# Altium footprint library FootPrintLib_12.PcbLib: 319 footprints (part 11 of 20)
Each footprint in its own frame and in the unit in brackets; x right, y up, seen from the top. Pads: shape width x height; smd on the part's side, far side on the other; paste and mask are expansions set on the pad; w line width, h text height; cw(c..) or ccw(c..) is an arc to the next point about the centre after c.
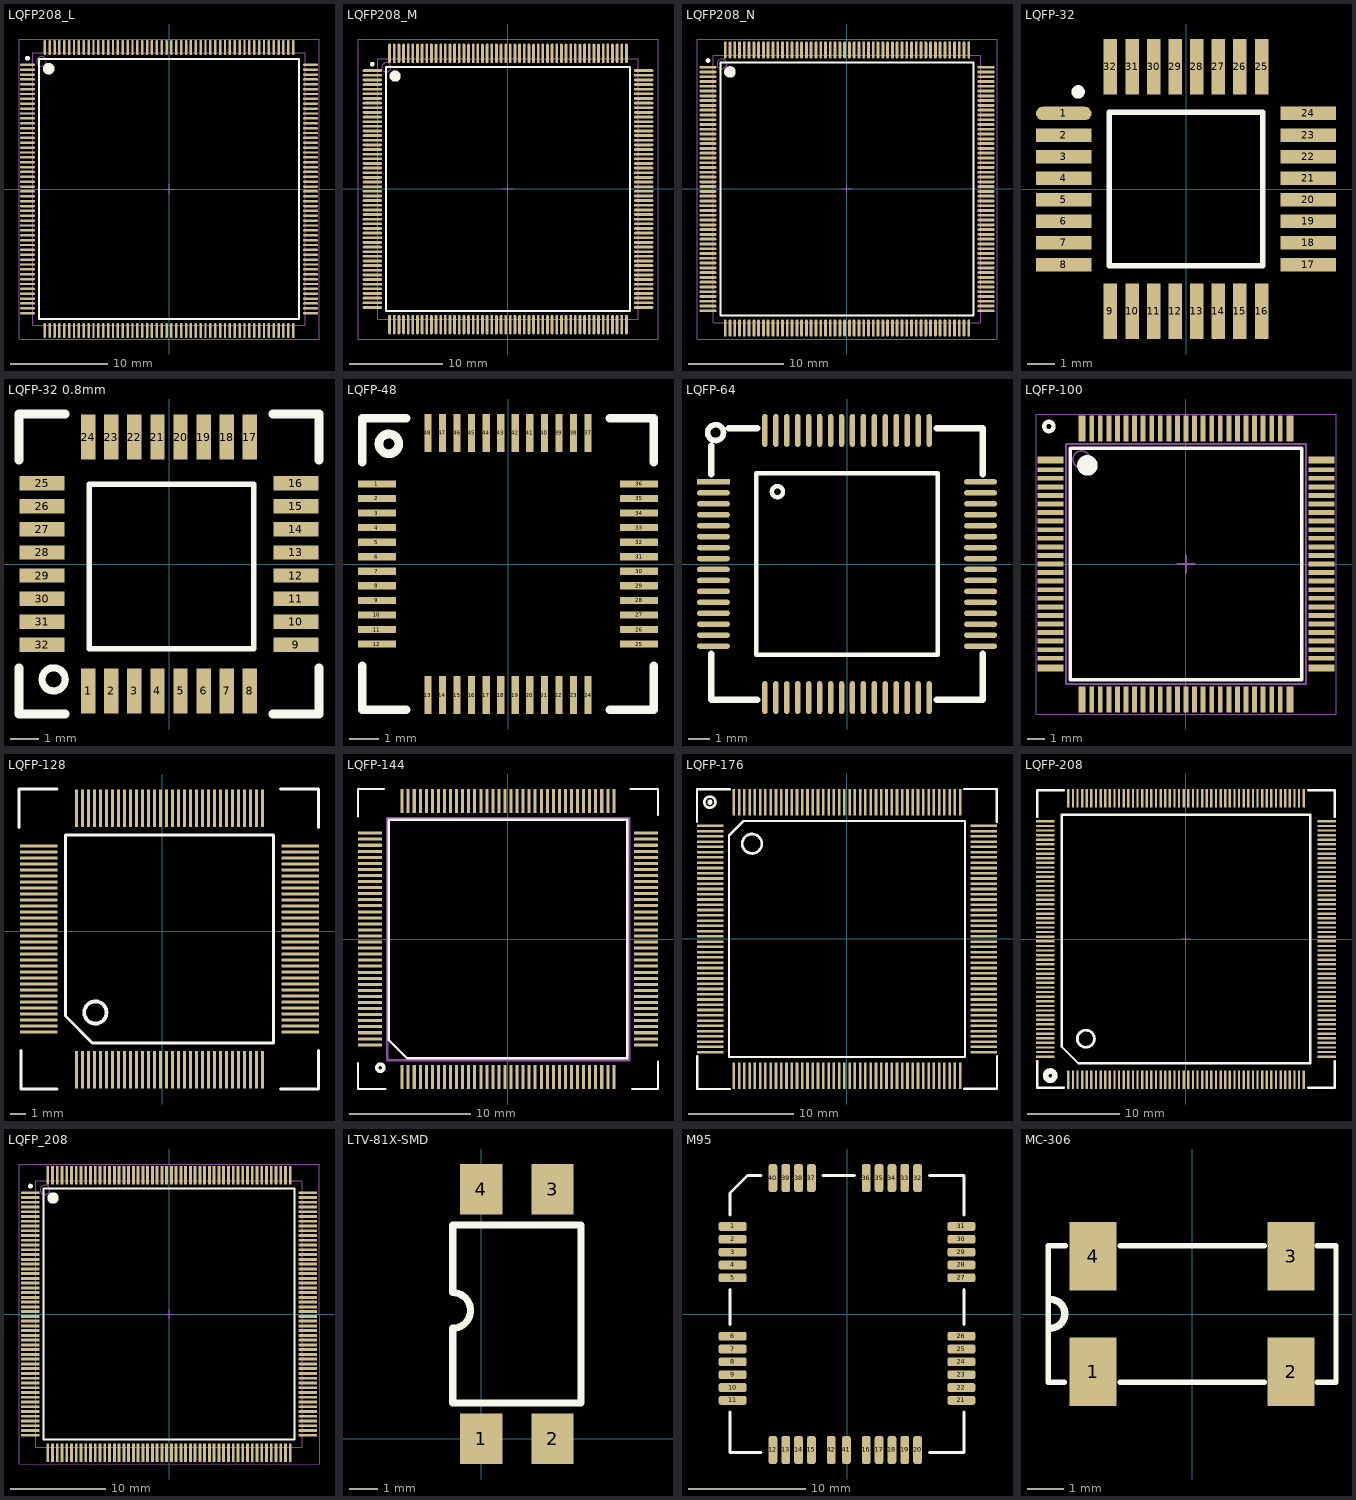
[diagram p10: the footprints below, top view; thin cyan lines are the x and y axes]

## LQFP208_L [mm] "QFP, 208-Leads, Body 28x28mm, Pitch 0.5mm, IPC High Density"
height 1.6
pads (208):
  oval 1.55x0.25 smd: 1(-14.525,12.75) 2(-14.525,12.25) 3(-14.525,11.75) 4(-14.525,11.25) 5(-14.525,10.75) 6(-14.525,10.25) 7(-14.525,9.75) 8(-14.525,9.25) 9(-14.525,8.75) 10(-14.525,8.25) 11(-14.525,7.75) 12(-14.525,7.25) 13(-14.525,6.75) 14(-14.525,6.25) 15(-14.525,5.75) 16(-14.525,5.25) 17(-14.525,4.75) 18(-14.525,4.25) 19(-14.525,3.75) 20(-14.525,3.25) 21(-14.525,2.75) 22(-14.525,2.25) 23(-14.525,1.75) 24(-14.525,1.25) 25(-14.525,0.75) 26(-14.525,0.25) 27(-14.525,-0.25) 28(-14.525,-0.75) 29(-14.525,-1.25) 30(-14.525,-1.75) 31(-14.525,-2.25) 32(-14.525,-2.75) 33(-14.525,-3.25) 34(-14.525,-3.75) 35(-14.525,-4.25) 36(-14.525,-4.75) 37(-14.525,-5.25) 38(-14.525,-5.75) 39(-14.525,-6.25) 40(-14.525,-6.75) 41(-14.525,-7.25) 42(-14.525,-7.75) 43(-14.525,-8.25) 44(-14.525,-8.75) 45(-14.525,-9.25) 46(-14.525,-9.75) 47(-14.525,-10.25) 48(-14.525,-10.75) 49(-14.525,-11.25) 50(-14.525,-11.75) 51(-14.525,-12.25) 52(-14.525,-12.75) 105(14.525,-12.75) 106(14.525,-12.25) 107(14.525,-11.75) 108(14.525,-11.25) 109(14.525,-10.75) 110(14.525,-10.25) 111(14.525,-9.75) 112(14.525,-9.25) 113(14.525,-8.75) 114(14.525,-8.25) 115(14.525,-7.75) 116(14.525,-7.25) 117(14.525,-6.75) 118(14.525,-6.25) 119(14.525,-5.75) 120(14.525,-5.25) 121(14.525,-4.75) 122(14.525,-4.25) 123(14.525,-3.75) 124(14.525,-3.25) 125(14.525,-2.75) 126(14.525,-2.25) 127(14.525,-1.75) 128(14.525,-1.25) 129(14.525,-0.75) 130(14.525,-0.25) 131(14.525,0.25) 132(14.525,0.75) 133(14.525,1.25) 134(14.525,1.75) 135(14.525,2.25) 136(14.525,2.75) 137(14.525,3.25) 138(14.525,3.75) 139(14.525,4.25) 140(14.525,4.75) 141(14.525,5.25) 142(14.525,5.75) 143(14.525,6.25) 144(14.525,6.75) 145(14.525,7.25) 146(14.525,7.75) 147(14.525,8.25) 148(14.525,8.75) 149(14.525,9.25) 150(14.525,9.75) 151(14.525,10.25) 152(14.525,10.75) 153(14.525,11.25) 154(14.525,11.75) 155(14.525,12.25) 156(14.525,12.75)
  oval 0.25x1.55 smd: 53(-12.75,-14.525) 54(-12.25,-14.525) 55(-11.75,-14.525) 56(-11.25,-14.525) 57(-10.75,-14.525) 58(-10.25,-14.525) 59(-9.75,-14.525) 60(-9.25,-14.525) 61(-8.75,-14.525) 62(-8.25,-14.525) 63(-7.75,-14.525) 64(-7.25,-14.525) 65(-6.75,-14.525) 66(-6.25,-14.525) 67(-5.75,-14.525) 68(-5.25,-14.525) 69(-4.75,-14.525) 70(-4.25,-14.525) 71(-3.75,-14.525) 72(-3.25,-14.525) 73(-2.75,-14.525) 74(-2.25,-14.525) 75(-1.75,-14.525) 76(-1.25,-14.525) 77(-0.75,-14.525) 78(-0.25,-14.525) 79(0.25,-14.525) 80(0.75,-14.525) 81(1.25,-14.525) 82(1.75,-14.525) 83(2.25,-14.525) 84(2.75,-14.525) 85(3.25,-14.525) 86(3.75,-14.525) 87(4.25,-14.525) 88(4.75,-14.525) 89(5.25,-14.525) 90(5.75,-14.525) 91(6.25,-14.525) 92(6.75,-14.525) 93(7.25,-14.525) 94(7.75,-14.525) 95(8.25,-14.525) 96(8.75,-14.525) 97(9.25,-14.525) 98(9.75,-14.525) 99(10.25,-14.525) 100(10.75,-14.525) 101(11.25,-14.525) 102(11.75,-14.525) 103(12.25,-14.525) 104(12.75,-14.525) 157(12.75,14.525) 158(12.25,14.525) 159(11.75,14.525) 160(11.25,14.525) 161(10.75,14.525) 162(10.25,14.525) 163(9.75,14.525) 164(9.25,14.525) 165(8.75,14.525) 166(8.25,14.525) 167(7.75,14.525) 168(7.25,14.525) 169(6.75,14.525) 170(6.25,14.525) 171(5.75,14.525) 172(5.25,14.525) 173(4.75,14.525) 174(4.25,14.525) 175(3.75,14.525) 176(3.25,14.525) 177(2.75,14.525) 178(2.25,14.525) 179(1.75,14.525) 180(1.25,14.525) 181(0.75,14.525) 182(0.25,14.525) 183(-0.25,14.525) 184(-0.75,14.525) 185(-1.25,14.525) 186(-1.75,14.525) 187(-2.25,14.525) 188(-2.75,14.525) 189(-3.25,14.525) 190(-3.75,14.525) 191(-4.25,14.525) 192(-4.75,14.525) 193(-5.25,14.525) 194(-5.75,14.525) 195(-6.25,14.525) 196(-6.75,14.525) 197(-7.25,14.525) 198(-7.75,14.525) 199(-8.25,14.525) 200(-8.75,14.525) 201(-9.25,14.525) 202(-9.75,14.525) 203(-10.25,14.525) 204(-10.75,14.525) 205(-11.25,14.525) 206(-11.75,14.525) 207(-12.25,14.525) 208(-12.75,14.525)
Top Overlay:
  circle w0.25: c-14.525,13.425 r0.125
  circle w0.6: c-12.35,12.35 r0.3
  lines w0.2: -13.35,-13.35 -13.35,13.35 13.35,13.35 13.35,-13.35 -13.35,-13.35
Mechanical 13:
  circle w0.1: c-13.1,13.1 r0.5
  lines w0.1: -14,-14 -14,14 14,14 14,-14 -14,-14
Mechanical 15:
  lines w0.05: -15.4,-15.4 -15.4,15.4 15.4,15.4 15.4,-15.4 -15.4,-15.4
  lines w0.1: -0.5,0 0.5,0 ; 0,-0.5 0,0.5
3D body: height 1.6, standoff 0.05, extent -14,-14 14,14

## LQFP208_M [mm] "QFP, 208-Leads, Body 28x28mm, Pitch 0.5mm, IPC Low Density"
height 1.6
pads (208):
  oval 2.1x0.3 smd: 1(-14.6,12.75) 2(-14.6,12.25) 3(-14.6,11.75) 4(-14.6,11.25) 5(-14.6,10.75) 6(-14.6,10.25) 7(-14.6,9.75) 8(-14.6,9.25) 9(-14.6,8.75) 10(-14.6,8.25) 11(-14.6,7.75) 12(-14.6,7.25) 13(-14.6,6.75) 14(-14.6,6.25) 15(-14.6,5.75) 16(-14.6,5.25) 17(-14.6,4.75) 18(-14.6,4.25) 19(-14.6,3.75) 20(-14.6,3.25) 21(-14.6,2.75) 22(-14.6,2.25) 23(-14.6,1.75) 24(-14.6,1.25) 25(-14.6,0.75) 26(-14.6,0.25) 27(-14.6,-0.25) 28(-14.6,-0.75) 29(-14.6,-1.25) 30(-14.6,-1.75) 31(-14.6,-2.25) 32(-14.6,-2.75) 33(-14.6,-3.25) 34(-14.6,-3.75) 35(-14.6,-4.25) 36(-14.6,-4.75) 37(-14.6,-5.25) 38(-14.6,-5.75) 39(-14.6,-6.25) 40(-14.6,-6.75) 41(-14.6,-7.25) 42(-14.6,-7.75) 43(-14.6,-8.25) 44(-14.6,-8.75) 45(-14.6,-9.25) 46(-14.6,-9.75) 47(-14.6,-10.25) 48(-14.6,-10.75) 49(-14.6,-11.25) 50(-14.6,-11.75) 51(-14.6,-12.25) 52(-14.6,-12.75) 105(14.6,-12.75) 106(14.6,-12.25) 107(14.6,-11.75) 108(14.6,-11.25) 109(14.6,-10.75) 110(14.6,-10.25) 111(14.6,-9.75) 112(14.6,-9.25) 113(14.6,-8.75) 114(14.6,-8.25) 115(14.6,-7.75) 116(14.6,-7.25) 117(14.6,-6.75) 118(14.6,-6.25) 119(14.6,-5.75) 120(14.6,-5.25) 121(14.6,-4.75) 122(14.6,-4.25) 123(14.6,-3.75) 124(14.6,-3.25) 125(14.6,-2.75) 126(14.6,-2.25) 127(14.6,-1.75) 128(14.6,-1.25) 129(14.6,-0.75) 130(14.6,-0.25) 131(14.6,0.25) 132(14.6,0.75) 133(14.6,1.25) 134(14.6,1.75) 135(14.6,2.25) 136(14.6,2.75) 137(14.6,3.25) 138(14.6,3.75) 139(14.6,4.25) 140(14.6,4.75) 141(14.6,5.25) 142(14.6,5.75) 143(14.6,6.25) 144(14.6,6.75) 145(14.6,7.25) 146(14.6,7.75) 147(14.6,8.25) 148(14.6,8.75) 149(14.6,9.25) 150(14.6,9.75) 151(14.6,10.25) 152(14.6,10.75) 153(14.6,11.25) 154(14.6,11.75) 155(14.6,12.25) 156(14.6,12.75)
  oval 0.3x2.1 smd: 53(-12.75,-14.6) 54(-12.25,-14.6) 55(-11.75,-14.6) 56(-11.25,-14.6) 57(-10.75,-14.6) 58(-10.25,-14.6) 59(-9.75,-14.6) 60(-9.25,-14.6) 61(-8.75,-14.6) 62(-8.25,-14.6) 63(-7.75,-14.6) 64(-7.25,-14.6) 65(-6.75,-14.6) 66(-6.25,-14.6) 67(-5.75,-14.6) 68(-5.25,-14.6) 69(-4.75,-14.6) 70(-4.25,-14.6) 71(-3.75,-14.6) 72(-3.25,-14.6) 73(-2.75,-14.6) 74(-2.25,-14.6) 75(-1.75,-14.6) 76(-1.25,-14.6) 77(-0.75,-14.6) 78(-0.25,-14.6) 79(0.25,-14.6) 80(0.75,-14.6) 81(1.25,-14.6) 82(1.75,-14.6) 83(2.25,-14.6) 84(2.75,-14.6) 85(3.25,-14.6) 86(3.75,-14.6) 87(4.25,-14.6) 88(4.75,-14.6) 89(5.25,-14.6) 90(5.75,-14.6) 91(6.25,-14.6) 92(6.75,-14.6) 93(7.25,-14.6) 94(7.75,-14.6) 95(8.25,-14.6) 96(8.75,-14.6) 97(9.25,-14.6) 98(9.75,-14.6) 99(10.25,-14.6) 100(10.75,-14.6) 101(11.25,-14.6) 102(11.75,-14.6) 103(12.25,-14.6) 104(12.75,-14.6) 157(12.75,14.6) 158(12.25,14.6) 159(11.75,14.6) 160(11.25,14.6) 161(10.75,14.6) 162(10.25,14.6) 163(9.75,14.6) 164(9.25,14.6) 165(8.75,14.6) 166(8.25,14.6) 167(7.75,14.6) 168(7.25,14.6) 169(6.75,14.6) 170(6.25,14.6) 171(5.75,14.6) 172(5.25,14.6) 173(4.75,14.6) 174(4.25,14.6) 175(3.75,14.6) 176(3.25,14.6) 177(2.75,14.6) 178(2.25,14.6) 179(1.75,14.6) 180(1.25,14.6) 181(0.75,14.6) 182(0.25,14.6) 183(-0.25,14.6) 184(-0.75,14.6) 185(-1.25,14.6) 186(-1.75,14.6) 187(-2.25,14.6) 188(-2.75,14.6) 189(-3.25,14.6) 190(-3.75,14.6) 191(-4.25,14.6) 192(-4.75,14.6) 193(-5.25,14.6) 194(-5.75,14.6) 195(-6.25,14.6) 196(-6.75,14.6) 197(-7.25,14.6) 198(-7.75,14.6) 199(-8.25,14.6) 200(-8.75,14.6) 201(-9.25,14.6) 202(-9.75,14.6) 203(-10.25,14.6) 204(-10.75,14.6) 205(-11.25,14.6) 206(-11.75,14.6) 207(-12.25,14.6) 208(-12.75,14.6)
Top Overlay:
  circle w0.25: c-14.6,13.45 r0.125
  circle w0.6: c-12.15,12.15 r0.3
  lines w0.2: -13.15,-13.15 -13.15,13.15 13.15,13.15 13.15,-13.15 -13.15,-13.15
Mechanical 13:
  circle w0.1: c-13.1,13.1 r0.5
  lines w0.1: -14,-14 -14,14 14,14 14,-14 -14,-14
Mechanical 15:
  lines w0.05: -16.15,-16.15 -16.15,16.15 16.15,16.15 16.15,-16.15 -16.15,-16.15
  lines w0.1: -0.5,0 0.5,0 ; 0,-0.5 0,0.5
3D body: height 1.6, standoff 0.05, extent -14,-14 14,14

## LQFP208_N [mm] "QFP, 208-Leads, Body 28x28mm, Pitch 0.5mm, IPC Medium Density"
height 1.6
pads (208):
  oval 1.8x0.3 smd: 1(-14.55,12.75) 2(-14.55,12.25) 3(-14.55,11.75) 4(-14.55,11.25) 5(-14.55,10.75) 6(-14.55,10.25) 7(-14.55,9.75) 8(-14.55,9.25) 9(-14.55,8.75) 10(-14.55,8.25) 11(-14.55,7.75) 12(-14.55,7.25) 13(-14.55,6.75) 14(-14.55,6.25) 15(-14.55,5.75) 16(-14.55,5.25) 17(-14.55,4.75) 18(-14.55,4.25) 19(-14.55,3.75) 20(-14.55,3.25) 21(-14.55,2.75) 22(-14.55,2.25) 23(-14.55,1.75) 24(-14.55,1.25) 25(-14.55,0.75) 26(-14.55,0.25) 27(-14.55,-0.25) 28(-14.55,-0.75) 29(-14.55,-1.25) 30(-14.55,-1.75) 31(-14.55,-2.25) 32(-14.55,-2.75) 33(-14.55,-3.25) 34(-14.55,-3.75) 35(-14.55,-4.25) 36(-14.55,-4.75) 37(-14.55,-5.25) 38(-14.55,-5.75) 39(-14.55,-6.25) 40(-14.55,-6.75) 41(-14.55,-7.25) 42(-14.55,-7.75) 43(-14.55,-8.25) 44(-14.55,-8.75) 45(-14.55,-9.25) 46(-14.55,-9.75) 47(-14.55,-10.25) 48(-14.55,-10.75) 49(-14.55,-11.25) 50(-14.55,-11.75) 51(-14.55,-12.25) 52(-14.55,-12.75) 105(14.55,-12.75) 106(14.55,-12.25) 107(14.55,-11.75) 108(14.55,-11.25) 109(14.55,-10.75) 110(14.55,-10.25) 111(14.55,-9.75) 112(14.55,-9.25) 113(14.55,-8.75) 114(14.55,-8.25) 115(14.55,-7.75) 116(14.55,-7.25) 117(14.55,-6.75) 118(14.55,-6.25) 119(14.55,-5.75) 120(14.55,-5.25) 121(14.55,-4.75) 122(14.55,-4.25) 123(14.55,-3.75) 124(14.55,-3.25) 125(14.55,-2.75) 126(14.55,-2.25) 127(14.55,-1.75) 128(14.55,-1.25) 129(14.55,-0.75) 130(14.55,-0.25) 131(14.55,0.25) 132(14.55,0.75) 133(14.55,1.25) 134(14.55,1.75) 135(14.55,2.25) 136(14.55,2.75) 137(14.55,3.25) 138(14.55,3.75) 139(14.55,4.25) 140(14.55,4.75) 141(14.55,5.25) 142(14.55,5.75) 143(14.55,6.25) 144(14.55,6.75) 145(14.55,7.25) 146(14.55,7.75) 147(14.55,8.25) 148(14.55,8.75) 149(14.55,9.25) 150(14.55,9.75) 151(14.55,10.25) 152(14.55,10.75) 153(14.55,11.25) 154(14.55,11.75) 155(14.55,12.25) 156(14.55,12.75)
  oval 0.3x1.8 smd: 53(-12.75,-14.55) 54(-12.25,-14.55) 55(-11.75,-14.55) 56(-11.25,-14.55) 57(-10.75,-14.55) 58(-10.25,-14.55) 59(-9.75,-14.55) 60(-9.25,-14.55) 61(-8.75,-14.55) 62(-8.25,-14.55) 63(-7.75,-14.55) 64(-7.25,-14.55) 65(-6.75,-14.55) 66(-6.25,-14.55) 67(-5.75,-14.55) 68(-5.25,-14.55) 69(-4.75,-14.55) 70(-4.25,-14.55) 71(-3.75,-14.55) 72(-3.25,-14.55) 73(-2.75,-14.55) 74(-2.25,-14.55) 75(-1.75,-14.55) 76(-1.25,-14.55) 77(-0.75,-14.55) 78(-0.25,-14.55) 79(0.25,-14.55) 80(0.75,-14.55) 81(1.25,-14.55) 82(1.75,-14.55) 83(2.25,-14.55) 84(2.75,-14.55) 85(3.25,-14.55) 86(3.75,-14.55) 87(4.25,-14.55) 88(4.75,-14.55) 89(5.25,-14.55) 90(5.75,-14.55) 91(6.25,-14.55) 92(6.75,-14.55) 93(7.25,-14.55) 94(7.75,-14.55) 95(8.25,-14.55) 96(8.75,-14.55) 97(9.25,-14.55) 98(9.75,-14.55) 99(10.25,-14.55) 100(10.75,-14.55) 101(11.25,-14.55) 102(11.75,-14.55) 103(12.25,-14.55) 104(12.75,-14.55) 157(12.75,14.55) 158(12.25,14.55) 159(11.75,14.55) 160(11.25,14.55) 161(10.75,14.55) 162(10.25,14.55) 163(9.75,14.55) 164(9.25,14.55) 165(8.75,14.55) 166(8.25,14.55) 167(7.75,14.55) 168(7.25,14.55) 169(6.75,14.55) 170(6.25,14.55) 171(5.75,14.55) 172(5.25,14.55) 173(4.75,14.55) 174(4.25,14.55) 175(3.75,14.55) 176(3.25,14.55) 177(2.75,14.55) 178(2.25,14.55) 179(1.75,14.55) 180(1.25,14.55) 181(0.75,14.55) 182(0.25,14.55) 183(-0.25,14.55) 184(-0.75,14.55) 185(-1.25,14.55) 186(-1.75,14.55) 187(-2.25,14.55) 188(-2.75,14.55) 189(-3.25,14.55) 190(-3.75,14.55) 191(-4.25,14.55) 192(-4.75,14.55) 193(-5.25,14.55) 194(-5.75,14.55) 195(-6.25,14.55) 196(-6.75,14.55) 197(-7.25,14.55) 198(-7.75,14.55) 199(-8.25,14.55) 200(-8.75,14.55) 201(-9.25,14.55) 202(-9.75,14.55) 203(-10.25,14.55) 204(-10.75,14.55) 205(-11.25,14.55) 206(-11.75,14.55) 207(-12.25,14.55) 208(-12.75,14.55)
Top Overlay:
  circle w0.25: c-14.55,13.45 r0.125
  circle w0.6: c-12.25,12.25 r0.3
  lines w0.2: -13.25,-13.25 -13.25,13.25 13.25,13.25 13.25,-13.25 -13.25,-13.25
Mechanical 13:
  circle w0.1: c-13.1,13.1 r0.5
  lines w0.1: -14,-14 -14,14 14,14 14,-14 -14,-14
Mechanical 15:
  lines w0.05: -15.7,-15.7 -15.7,15.7 15.7,15.7 15.7,-15.7 -15.7,-15.7
  lines w0.1: -0.5,0 0.5,0 ; 0,-0.5 0,0.5
3D body: height 1.6, standoff 0.05, extent -14,-14 14,14

## LQFP-32 [mm]
height 1.6
pads (32):
  oval 2.058x0.5 smd: 1(-4.533,2.8)
  rect 2.058x0.5 smd: 2(-4.533,2) 3(-4.533,1.2) 4(-4.533,0.4) 5(-4.533,-0.4) 6(-4.533,-1.2) 7(-4.533,-2) 8(-4.533,-2.8) 17(4.533,-2.8) 18(4.533,-2) 19(4.533,-1.2) 20(4.533,-0.4) 21(4.533,0.4) 22(4.533,1.2) 23(4.533,2) 24(4.533,2.8)
  rect 0.5x2.058 smd: 9(-2.8,-4.533) 10(-2,-4.533) 11(-1.2,-4.533) 12(-0.4,-4.533) 13(0.4,-4.533) 14(1.2,-4.533) 15(2,-4.533) 16(2.8,-4.533) 25(2.8,4.533) 26(2,4.533) 27(1.2,4.533) 28(0.4,4.533) 29(-0.4,4.533) 30(-1.2,4.533) 31(-2,4.533) 32(-2.8,4.533)
Top Overlay:
  circle w0.25: c-4,3.6 r0.125
  lines w0.2: -2.85,-2.85 2.85,-2.85 2.85,2.85 -2.85,2.85 -2.85,-2.85

## LQFP-32 0.8mm [mm]
pads (32):
  rect 0.5x1.55 smd: 1(-2.8,-4.4) 2(-2,-4.4) 3(-1.2,-4.4) 4(-0.4,-4.4) 5(0.4,-4.4) 6(1.2,-4.4) 7(2,-4.4) 8(2.8,-4.4) 17(2.8,4.4) 18(2,4.4) 19(1.2,4.4) 20(0.4,4.4) 21(-0.4,4.4) 22(-1.2,4.4) 23(-2,4.4) 24(-2.8,4.4)
  rect 1.55x0.5 smd: 9(4.4,-2.8) 10(4.4,-2) 11(4.4,-1.2) 12(4.4,-0.4) 13(4.4,0.4) 14(4.4,1.2) 15(4.4,2) 16(4.4,2.8) 25(-4.4,2.8) 26(-4.4,2) 27(-4.4,1.2) 28(-4.4,0.4) 29(-4.4,-0.4) 30(-4.4,-1.2) 31(-4.4,-2) 32(-4.4,-2.8)
Top Overlay:
  circle w0.25: c-4,-4 r0.4
  lines w0.2: -2.761,-2.939 2.939,-2.939 2.939,2.761 -2.761,2.761 -2.761,-2.939
  lines w0.3: -5.2,-3.6 -5.2,-5.2 -3.6,-5.2 ; -5.2,3.6 -5.2,5.2 -3.6,5.2 ; 3.6,-5.2 5.2,-5.2 5.2,-3.6 ; 3.6,5.2 5.2,5.2 5.2,3.6
3D body "SW3dPS-SW3dPS-atmega8 (tqfp32)_V2008.STEP": height 1.1, standoff -0.01, extent -4.8,-4.8 4.8,4.8

## LQFP-48 [mm]
pads (48):
  rect 1.3x0.25 smd mask+0.05: 1(-4.5,2.75) 2(-4.5,2.25) 3(-4.5,1.75) 4(-4.5,1.25) 5(-4.5,0.75) 6(-4.5,0.25) 7(-4.5,-0.25) 8(-4.5,-0.75) 9(-4.5,-1.25) 10(-4.5,-1.75) 11(-4.5,-2.25) 12(-4.5,-2.75) 25(4.5,-2.75) 26(4.5,-2.25) 27(4.5,-1.75) 28(4.5,-1.25) 29(4.5,-0.75) 30(4.5,-0.25) 31(4.5,0.25) 32(4.5,0.75) 33(4.5,1.25) 34(4.5,1.75) 35(4.5,2.25) 36(4.5,2.75)
  rect 0.25x1.3 smd mask+0.05: 13(-2.75,-4.5) 14(-2.25,-4.5) 15(-1.75,-4.5) 16(-1.25,-4.5) 17(-0.75,-4.5) 18(-0.25,-4.5) 19(0.25,-4.5) 20(0.75,-4.5) 21(1.25,-4.5) 22(1.75,-4.5) 23(2.25,-4.5) 24(2.75,-4.5) 37(2.75,4.5) 38(2.25,4.5) 39(1.75,4.5) 40(1.25,4.5) 41(0.75,4.5) 42(0.25,4.5) 43(-0.25,4.5) 44(-0.75,4.5) 45(-1.25,4.5) 46(-1.75,4.5) 47(-2.25,4.5) 48(-2.75,4.5)
Top Overlay:
  circle w0.3: c-4.09,4.125 r0.34
  lines w0.3: -5,-3.5 -5,-5 -3.5,-5 ; -5,3.5 -5,5 -3.5,5 ; 3.5,-5 5,-5 5,-3.5 ; 3.5,5 5,5 5,3.5
3D body "SW3dPS-Quad50M48.STEP": height 1.56, standoff 0, extent -4.5,-4.5 4.5,4.5

## LQFP-64 [mm]
pads (64):
  rect 1.5x0.25 smd mask+0.05: 1(-6.1,3.75)
  oval 1.5x0.25 smd mask+0.05: 2(-6.1,3.25) 3(-6.1,2.75) 4(-6.1,2.25) 5(-6.1,1.75) 6(-6.1,1.25) 7(-6.1,0.75) 8(-6.1,0.25) 9(-6.1,-0.25) 10(-6.1,-0.75) 11(-6.1,-1.25) 12(-6.1,-1.75) 13(-6.1,-2.25) 14(-6.1,-2.75) 15(-6.1,-3.25) 16(-6.1,-3.75) 33(6.1,-3.75) 34(6.1,-3.25) 35(6.1,-2.75) 36(6.1,-2.25) 37(6.1,-1.75) 38(6.1,-1.25) 39(6.1,-0.75) 40(6.1,-0.25) 41(6.1,0.25) 42(6.1,0.75) 43(6.1,1.25) 44(6.1,1.75) 45(6.1,2.25) 46(6.1,2.75) 47(6.1,3.25) 48(6.1,3.75)
  oval 0.25x1.5 smd mask+0.05: 17(-3.75,-6.1) 18(-3.25,-6.1) 19(-2.75,-6.1) 20(-2.25,-6.1) 21(-1.75,-6.1) 22(-1.25,-6.1) 23(-0.75,-6.1) 24(-0.25,-6.1) 25(0.25,-6.1) 26(0.75,-6.1) 27(1.25,-6.1) 28(1.75,-6.1) 29(2.25,-6.1) 30(2.75,-6.1) 31(3.25,-6.1) 32(3.75,-6.1) 49(3.75,6.1) 50(3.25,6.1) 51(2.75,6.1) 52(2.25,6.1) 53(1.75,6.1) 54(1.25,6.1) 55(0.75,6.1) 56(0.25,6.1) 57(-0.25,6.1) 58(-0.75,6.1) 59(-1.25,6.1) 60(-1.75,6.1) 61(-2.25,6.1) 62(-2.75,6.1) 63(-3.25,6.1) 64(-3.75,6.1)
Top Overlay:
  circle w0.254: c-6,6 r0.361
  circle w0.2: c-3.175,3.302 r0.254
  lines w0.2: -4.15,-4.15 4.15,-4.15 4.15,4.15 -4.15,4.15 -4.15,-4.15
  lines w0.3: -6.2,-4.1 -6.2,-6.2 -4.1,-6.2 ; -6.2,4.1 -6.2,5.4 ; -5.4,6.2 -4.1,6.2 ; 4.1,-6.2 6.2,-6.2 6.2,-4.1 ; 4.1,6.2 6.2,6.2 6.2,4.1
3D body "User Library-LQFP-64.STEP": height 1.7, standoff -0.01, extent -5.996,-5.977 6.004,6.023

## LQFP-100 [mm]
pads (100):
  rect 1.5x0.4 smd mask+0.03: 1(-7.9,6.06) 25(-7.9,-6.06) 51(7.9,-6.06) 75(7.9,6.06)
  rect 1.5x0.28 smd mask+0.03: 2(-7.9,5.5) 3(-7.9,5) 4(-7.9,4.5) 5(-7.9,4) 6(-7.9,3.5) 7(-7.9,3) 8(-7.9,2.5) 9(-7.9,2) 10(-7.9,1.5) 11(-7.9,1) 12(-7.9,0.5) 13(-7.9,0) 14(-7.9,-0.5) 15(-7.9,-1) 16(-7.9,-1.5) 17(-7.9,-2) 18(-7.9,-2.5) 19(-7.9,-3) 20(-7.9,-3.5) 21(-7.9,-4) 22(-7.9,-4.5) 23(-7.9,-5) 24(-7.9,-5.5) 52(7.9,-5.5) 53(7.9,-5) 54(7.9,-4.5) 55(7.9,-4) 56(7.9,-3.5) 57(7.9,-3) 58(7.9,-2.5) 59(7.9,-2) 60(7.9,-1.5) 61(7.9,-1) 62(7.9,-0.5) 63(7.9,0) 64(7.9,0.5) 65(7.9,1) 66(7.9,1.5) 67(7.9,2) 68(7.9,2.5) 69(7.9,3) 70(7.9,3.5) 71(7.9,4) 72(7.9,4.5) 73(7.9,5) 74(7.9,5.5)
  rect 0.4x1.5 smd mask+0.03: 26(-6.06,-7.9) 50(6.06,-7.9) 76(6.06,7.9) 100(-6.06,7.9)
  rect 0.28x1.5 smd mask+0.03: 27(-5.5,-7.9) 28(-5,-7.9) 29(-4.5,-7.9) 30(-4,-7.9) 31(-3.5,-7.9) 32(-3,-7.9) 33(-2.5,-7.9) 34(-2,-7.9) 35(-1.5,-7.9) 36(-1,-7.9) 37(-0.5,-7.9) 38(0,-7.9) 39(0.5,-7.9) 40(1,-7.9) 41(1.5,-7.9) 42(2,-7.9) 43(2.5,-7.9) 44(3,-7.9) 45(3.5,-7.9) 46(4,-7.9) 47(4.5,-7.9) 48(5,-7.9) 49(5.5,-7.9) 77(5.5,7.9) 78(5,7.9) 79(4.5,7.9) 80(4,7.9) 81(3.5,7.9) 82(3,7.9) 83(2.5,7.9) 84(2,7.9) 85(1.5,7.9) 86(1,7.9) 87(0.5,7.9) 88(0,7.9) 89(-0.5,7.9) 90(-1,7.9) 91(-1.5,7.9) 92(-2,7.9) 93(-2.5,7.9) 94(-3,7.9) 95(-3.5,7.9) 96(-4,7.9) 97(-4.5,7.9) 98(-5,7.9) 99(-5.5,7.9)
Top Overlay:
  circle w0.25: c-8,8.025 r0.276
  circle w0.6: c-5.75,5.75 r0.3
  lines w0.2: -6.75,-6.75 -6.75,6.75 6.75,6.75 6.75,-6.75 -6.75,-6.75
Mechanical 13:
  circle w0.1: c-6.1,6.1 r0.5
  lines w0.1: -7,-7 -7,7 7,7 7,-7 -7,-7
Mechanical 15:
  lines w0.05: -8.75,-8.75 -8.75,8.75 8.75,8.75 8.75,-8.75 -8.75,-8.75
  lines w0.1: -0.5,0 0.5,0 ; 0,-0.5 0,0.5
3D body "User Library-lqfp100-1.STEP": height 1.5, standoff 0.02, extent -8,-7.994 8,8.006

## LQFP-128 [mm]
pads (128):
  rect 0.2x2.5 smd: 1(-5.725,-9.225) 2(-5.325,-9.225) 3(-4.925,-9.225) 4(-4.525,-9.225) 5(-4.125,-9.225) 6(-3.725,-9.225) 7(-3.325,-9.225) 8(-2.925,-9.225) 9(-2.525,-9.225) 10(-2.125,-9.225) 11(-1.725,-9.225) 12(-1.325,-9.225) 13(-0.925,-9.225) 14(-0.525,-9.225) 15(-0.125,-9.225) 16(0.275,-9.225) 17(0.675,-9.225) 18(1.075,-9.225) 19(1.475,-9.225) 20(1.875,-9.225) 21(2.275,-9.225) 22(2.675,-9.225) 23(3.075,-9.225) 24(3.475,-9.225) 25(3.875,-9.225) 26(4.275,-9.225) 27(4.675,-9.225) 28(5.075,-9.225) 29(5.475,-9.225) 30(5.875,-9.225) 31(6.275,-9.225) 32(6.675,-9.225) 65(6.675,8.175) 66(6.275,8.175) 67(5.875,8.175) 68(5.475,8.175) 69(5.075,8.175) 70(4.675,8.175) 71(4.275,8.175) 72(3.875,8.175) 73(3.475,8.175) 74(3.075,8.175) 75(2.675,8.175) 76(2.275,8.175) 77(1.875,8.175) 78(1.475,8.175) 79(1.075,8.175) 80(0.675,8.175) 81(0.275,8.175) 82(-0.125,8.175) 83(-0.525,8.175) 84(-0.925,8.175) 85(-1.325,8.175) 86(-1.725,8.175) 87(-2.125,8.175) 88(-2.525,8.175) 89(-2.925,8.175) 90(-3.325,8.175) 91(-3.725,8.175) 92(-4.125,8.175) 93(-4.525,8.175) 94(-4.925,8.175) 95(-5.325,8.175) 96(-5.725,8.175)
  rect 2.5x0.2 smd: 33(9.175,-6.725) 34(9.175,-6.325) 35(9.175,-5.925) 36(9.175,-5.525) 37(9.175,-5.125) 38(9.175,-4.725) 39(9.175,-4.325) 40(9.175,-3.925) 41(9.175,-3.525) 42(9.175,-3.125) 43(9.175,-2.725) 44(9.175,-2.325) 45(9.175,-1.925) 46(9.175,-1.525) 47(9.175,-1.125) 48(9.175,-0.725) 49(9.175,-0.325) 50(9.175,0.075) 51(9.175,0.475) 52(9.175,0.875) 53(9.175,1.275) 54(9.175,1.675) 55(9.175,2.075) 56(9.175,2.475) 57(9.175,2.875) 58(9.175,3.275) 59(9.175,3.675) 60(9.175,4.075) 61(9.175,4.475) 62(9.175,4.875) 63(9.175,5.275) 64(9.175,5.675) 97(-8.225,5.675) 98(-8.225,5.275) 99(-8.225,4.875) 100(-8.225,4.475) 101(-8.225,4.075) 102(-8.225,3.675) 103(-8.225,3.275) 104(-8.225,2.875) 105(-8.225,2.475) 106(-8.225,2.075) 107(-8.225,1.675) 108(-8.225,1.275) 109(-8.225,0.875) 110(-8.225,0.475) 111(-8.225,0.075) 112(-8.225,-0.325) 113(-8.225,-0.725) 114(-8.225,-1.125) 115(-8.225,-1.525) 116(-8.225,-1.925) 117(-8.225,-2.325) 118(-8.225,-2.725) 119(-8.225,-3.125) 120(-8.225,-3.525) 121(-8.225,-3.925) 122(-8.225,-4.325) 123(-8.225,-4.725) 124(-8.225,-5.125) 125(-8.225,-5.525) 126(-8.225,-5.925) 127(-8.225,-6.325) 128(-8.225,-6.725)
Top Overlay:
  circle w0.254: c-4.455,-5.415 r0.741
  lines w0.2: -9.535,6.904 -9.535,9.444 -6.995,9.444 ; -9.408,-7.955 -9.408,-10.495 -6.995,-10.495 ; 7.864,-10.495 10.404,-10.495 10.404,-7.955 ; 7.864,9.444 10.404,9.444 10.404,6.904 ; -6.44,-5.655 -6.44,6.39 7.39,6.39 7.39,-7.44 -4.655,-7.44 -6.44,-5.655
3D body: height 1.35, standoff 0, extent -7.525,-8.525 8.475,7.475

## LQFP-144 [mm]
pads (144):
  rect 0.25x2 smd mask+0.05: 1(-8.75,-11.4) 2(-8.25,-11.4) 3(-7.75,-11.4) 4(-7.25,-11.4) 5(-6.75,-11.4) 6(-6.25,-11.4) 7(-5.75,-11.4) 8(-5.25,-11.4) 9(-4.75,-11.4) 10(-4.25,-11.4) 11(-3.75,-11.4) 12(-3.25,-11.4) 13(-2.75,-11.4) 14(-2.25,-11.4) 15(-1.75,-11.4) 16(-1.25,-11.4) 17(-0.75,-11.4) 18(-0.25,-11.4) 19(0.25,-11.4) 20(0.75,-11.4) 21(1.25,-11.4) 22(1.75,-11.4) 23(2.25,-11.4) 24(2.75,-11.4) 25(3.25,-11.4) 26(3.75,-11.4) 27(4.25,-11.4) 28(4.75,-11.4) 29(5.25,-11.4) 30(5.75,-11.4) 31(6.25,-11.4) 32(6.75,-11.4) 33(7.25,-11.4) 34(7.75,-11.4) 35(8.25,-11.4) 36(8.75,-11.4) 73(8.75,11.4) 74(8.25,11.4) 75(7.75,11.4) 76(7.25,11.4) 77(6.75,11.4) 78(6.25,11.4) 79(5.75,11.4) 80(5.25,11.4) 81(4.75,11.4) 82(4.25,11.4) 83(3.75,11.4) 84(3.25,11.4) 85(2.75,11.4) 86(2.25,11.4) 87(1.75,11.4) 88(1.25,11.4) 89(0.75,11.4) 90(0.25,11.4) 91(-0.25,11.4) 92(-0.75,11.4) 93(-1.25,11.4) 94(-1.75,11.4) 95(-2.25,11.4) 96(-2.75,11.4) 97(-3.25,11.4) 98(-3.75,11.4) 99(-4.25,11.4) 100(-4.75,11.4) 101(-5.25,11.4) 102(-5.75,11.4) 103(-6.25,11.4) 104(-6.75,11.4) 105(-7.25,11.4) 106(-7.75,11.4) 107(-8.25,11.4) 108(-8.75,11.4)
  rect 2x0.25 smd mask+0.05: 37(11.4,-8.75) 38(11.4,-8.25) 39(11.4,-7.75) 40(11.4,-7.25) 41(11.4,-6.75) 42(11.4,-6.25) 43(11.4,-5.75) 44(11.4,-5.25) 45(11.4,-4.75) 46(11.4,-4.25) 47(11.4,-3.75) 48(11.4,-3.25) 49(11.4,-2.75) 50(11.4,-2.25) 51(11.4,-1.75) 52(11.4,-1.25) 53(11.4,-0.75) 54(11.4,-0.25) 55(11.4,0.25) 56(11.4,0.75) 57(11.4,1.25) 58(11.4,1.75) 59(11.4,2.25) 60(11.4,2.75) 61(11.4,3.25) 62(11.4,3.75) 63(11.4,4.25) 64(11.4,4.75) 65(11.4,5.25) 66(11.4,5.75) 67(11.4,6.25) 68(11.4,6.75) 69(11.4,7.25) 70(11.4,7.75) 71(11.4,8.25) 72(11.4,8.75) 109(-11.4,8.75) 110(-11.4,8.25) 111(-11.4,7.75) 112(-11.4,7.25) 113(-11.4,6.75) 114(-11.4,6.25) 115(-11.4,5.75) 116(-11.4,5.25) 117(-11.4,4.75) 118(-11.4,4.25) 119(-11.4,3.75) 120(-11.4,3.25) 121(-11.4,2.75) 122(-11.4,2.25) 123(-11.4,1.75) 124(-11.4,1.25) 125(-11.4,0.75) 126(-11.4,0.25) 127(-11.4,-0.25) 128(-11.4,-0.75) 129(-11.4,-1.25) 130(-11.4,-1.75) 131(-11.4,-2.25) 132(-11.4,-2.75) 133(-11.4,-3.25) 134(-11.4,-3.75) 135(-11.4,-4.25) 136(-11.4,-4.75) 137(-11.4,-5.25) 138(-11.4,-5.75) 139(-11.4,-6.25) 140(-11.4,-6.75) 141(-11.4,-7.25) 142(-11.4,-7.75) 143(-11.4,-8.25) 144(-11.4,-8.75)
Top Overlay:
  circle w0.3: c-10.555,-10.638 r0.293
  lines w0.2: -12.4,-10.275 -12.4,-12.4 -10.15,-12.4 ; -12.4,10.15 -12.4,12.4 -10.275,12.4 ; 10.15,12.4 12.4,12.4 12.4,10.275 ; 10.275,-12.4 12.4,-12.4 12.4,-10.15 ; -9.865,-8.33 -8.33,-9.865 9.865,-9.865 9.865,9.865 -9.865,9.865 -9.865,-8.33
Mechanical 1:
  lines w0.2: -9.98,-10.02 10.02,-10.02 10.02,9.98 -9.98,9.98 -9.98,-10.02
3D body "User Library-LQFP144_STM32F4.STEP": height 2, standoff 0.1, extent -11,-11 11,11

## LQFP-176 [mm]
pads (176):
  rect 2.5x0.25 smd: 1(-13,10.75) 2(-13,10.25) 3(-13,9.75) 4(-13,9.25) 5(-13,8.75) 6(-13,8.25) 7(-13,7.75) 8(-13,7.25) 9(-13,6.75) 10(-13,6.25) 11(-13,5.75) 12(-13,5.25) 13(-13,4.75) 14(-13,4.25) 15(-13,3.75) 16(-13,3.25) 17(-13,2.75) 18(-13,2.25) 19(-13,1.75) 20(-13,1.25) 21(-13,0.75) 22(-13,0.25) 23(-13,-0.25) 24(-13,-0.75) 25(-13,-1.25) 26(-13,-1.75) 27(-13,-2.25) 28(-13,-2.75) 29(-13,-3.25) 30(-13,-3.75) 31(-13,-4.25) 32(-13,-4.75) 33(-13,-5.25) 34(-13,-5.75) 35(-13,-6.25) 36(-13,-6.75) 37(-13,-7.25) 38(-13,-7.75) 39(-13,-8.25) 40(-13,-8.75) 41(-13,-9.25) 42(-13,-9.75) 43(-13,-10.25) 44(-13,-10.75) 89(13,-10.75) 90(13,-10.25) 91(13,-9.75) 92(13,-9.25) 93(13,-8.75) 94(13,-8.25) 95(13,-7.75) 96(13,-7.25) 97(13,-6.75) 98(13,-6.25) 99(13,-5.75) 100(13,-5.25) 101(13,-4.75) 102(13,-4.25) 103(13,-3.75) 104(13,-3.25) 105(13,-2.75) 106(13,-2.25) 107(13,-1.75) 108(13,-1.25) 109(13,-0.75) 110(13,-0.25) 111(13,0.25) 112(13,0.75) 113(13,1.25) 114(13,1.75) 115(13,2.25) 116(13,2.75) 117(13,3.25) 118(13,3.75) 119(13,4.25) 120(13,4.75) 121(13,5.25) 122(13,5.75) 123(13,6.25) 124(13,6.75) 125(13,7.25) 126(13,7.75) 127(13,8.25) 128(13,8.75) 129(13,9.25) 130(13,9.75) 131(13,10.25) 132(13,10.75)
  rect 0.25x2.5 smd: 45(-10.75,-13) 46(-10.25,-13) 47(-9.75,-13) 48(-9.25,-13) 49(-8.75,-13) 50(-8.25,-13) 51(-7.75,-13) 52(-7.25,-13) 53(-6.75,-13) 54(-6.25,-13) 55(-5.75,-13) 56(-5.25,-13) 57(-4.75,-13) 58(-4.25,-13) 59(-3.75,-13) 60(-3.25,-13) 61(-2.75,-13) 62(-2.25,-13) 63(-1.75,-13) 64(-1.25,-13) 65(-0.75,-13) 66(-0.25,-13) 67(0.25,-13) 68(0.75,-13) 69(1.25,-13) 70(1.75,-13) 71(2.25,-13) 72(2.75,-13) 73(3.25,-13) 74(3.75,-13) 75(4.25,-13) 76(4.75,-13) 77(5.25,-13) 78(5.75,-13) 79(6.25,-13) 80(6.75,-13) 81(7.25,-13) 82(7.75,-13) 83(8.25,-13) 84(8.75,-13) 85(9.25,-13) 86(9.75,-13) 87(10.25,-13) 88(10.75,-13) 133(10.75,13) 134(10.25,13) 135(9.75,13) 136(9.25,13) 137(8.75,13) 138(8.25,13) 139(7.75,13) 140(7.25,13) 141(6.75,13) 142(6.25,13) 143(5.75,13) 144(5.25,13) 145(4.75,13) 146(4.25,13) 147(3.75,13) 148(3.25,13) 149(2.75,13) 150(2.25,13) 151(1.75,13) 152(1.25,13) 153(0.75,13) 154(0.25,13) 155(-0.25,13) 156(-0.75,13) 157(-1.25,13) 158(-1.75,13) 159(-2.25,13) 160(-2.75,13) 161(-3.25,13) 162(-3.75,13) 163(-4.25,13) 164(-4.75,13) 165(-5.25,13) 166(-5.75,13) 167(-6.25,13) 168(-6.75,13) 169(-7.25,13) 170(-7.75,13) 171(-8.25,13) 172(-8.75,13) 173(-9.25,13) 174(-9.75,13) 175(-10.25,13) 176(-10.75,13)
Top Overlay:
  circle w0.254: c-13.025,13 r0.527
  circle w0.25: c-13.025,13 r0.125
  circle w0.254: c-9.025,9.05 r0.925
  lines w0.2: -14.25,11.125 -14.25,14.225 -11.125,14.225 ; -14.225,-11.125 -14.225,-14.25 -11.125,-14.25 ; 11.125,-14.225 14.25,-14.225 14.25,-11.125 ; 11.125,14.25 14.225,14.25 14.225,11.125 ; -11.215,-11.215 -11.215,9.835 -9.835,11.215 11.215,11.215 11.215,-11.215 -11.215,-11.215
3D body "User Library-LQFP176-0_5.STEP": height 1.55, standoff -0.02, extent -12.886,-12.886 12.886,12.886

## LQFP-208 [mm]
pads (208):
  rect 0.25x2 smd mask+0.05: 1(-12.75,-15.25) 2(-12.25,-15.25) 3(-11.75,-15.25) 4(-11.25,-15.25) 5(-10.75,-15.25) 6(-10.25,-15.25) 7(-9.75,-15.25) 8(-9.25,-15.25) 9(-8.75,-15.25) 10(-8.25,-15.25) 11(-7.75,-15.25) 12(-7.25,-15.25) 13(-6.75,-15.25) 14(-6.25,-15.25) 15(-5.75,-15.25) 16(-5.25,-15.25) 17(-4.75,-15.25) 18(-4.25,-15.25) 19(-3.75,-15.25) 20(-3.25,-15.25) 21(-2.75,-15.25) 22(-2.25,-15.25) 23(-1.75,-15.25) 24(-1.25,-15.25) 25(-0.75,-15.25) 26(-0.25,-15.25) 27(0.25,-15.25) 28(0.75,-15.25) 29(1.25,-15.25) 30(1.75,-15.25) 31(2.25,-15.25) 32(2.75,-15.25) 33(3.25,-15.25) 34(3.75,-15.25) 35(4.25,-15.25) 36(4.75,-15.25) 37(5.25,-15.25) 38(5.75,-15.25) 39(6.25,-15.25) 40(6.75,-15.25) 41(7.25,-15.25) 42(7.75,-15.25) 43(8.25,-15.25) 44(8.75,-15.25) 45(9.25,-15.25) 46(9.75,-15.25) 47(10.25,-15.25) 48(10.75,-15.25) 49(11.25,-15.25) 50(11.75,-15.25) 51(12.25,-15.25) 52(12.75,-15.25) 105(12.75,15.25) 106(12.25,15.25) 107(11.75,15.25) 108(11.25,15.25) 109(10.75,15.25) 110(10.25,15.25) 111(9.75,15.25) 112(9.25,15.25) 113(8.75,15.25) 114(8.25,15.25) 115(7.75,15.25) 116(7.25,15.25) 117(6.75,15.25) 118(6.25,15.25) 119(5.75,15.25) 120(5.25,15.25) 121(4.75,15.25) 122(4.25,15.25) 123(3.75,15.25) 124(3.25,15.25) 125(2.75,15.25) 126(2.25,15.25) 127(1.75,15.25) 128(1.25,15.25) 129(0.75,15.25) 130(0.25,15.25) 131(-0.25,15.25) 132(-0.75,15.25) 133(-1.25,15.25) 134(-1.75,15.25) 135(-2.25,15.25) 136(-2.75,15.25) 137(-3.25,15.25) 138(-3.75,15.25) 139(-4.25,15.25) 140(-4.75,15.25) 141(-5.25,15.25) 142(-5.75,15.25) 143(-6.25,15.25) 144(-6.75,15.25) 145(-7.25,15.25) 146(-7.75,15.25) 147(-8.25,15.25) 148(-8.75,15.25) 149(-9.25,15.25) 150(-9.75,15.25) 151(-10.25,15.25) 152(-10.75,15.25) 153(-11.25,15.25) 154(-11.75,15.25) 155(-12.25,15.25) 156(-12.75,15.25)
  rect 2x0.25 smd mask+0.05: 53(15.25,-12.75) 54(15.25,-12.25) 55(15.25,-11.75) 56(15.25,-11.25) 57(15.25,-10.75) 58(15.25,-10.25) 59(15.25,-9.75) 60(15.25,-9.25) 61(15.25,-8.75) 62(15.25,-8.25) 63(15.25,-7.75) 64(15.25,-7.25) 65(15.25,-6.75) 66(15.25,-6.25) 67(15.25,-5.75) 68(15.25,-5.25) 69(15.25,-4.75) 70(15.25,-4.25) 71(15.25,-3.75) 72(15.25,-3.25) 73(15.25,-2.75) 74(15.25,-2.25) 75(15.25,-1.75) 76(15.25,-1.25) 77(15.25,-0.75) 78(15.25,-0.25) 79(15.25,0.25) 80(15.25,0.75) 81(15.25,1.25) 82(15.25,1.75) 83(15.25,2.25) 84(15.25,2.75) 85(15.25,3.25) 86(15.25,3.75) 87(15.25,4.25) 88(15.25,4.75) 89(15.25,5.25) 90(15.25,5.75) 91(15.25,6.25) 92(15.25,6.75) 93(15.25,7.25) 94(15.25,7.75) 95(15.25,8.25) 96(15.25,8.75) 97(15.25,9.25) 98(15.25,9.75) 99(15.25,10.25) 100(15.25,10.75) 101(15.25,11.25) 102(15.25,11.75) 103(15.25,12.25) 104(15.25,12.75) 157(-15.25,12.75) 158(-15.25,12.25) 159(-15.25,11.75) 160(-15.25,11.25) 161(-15.25,10.75) 162(-15.25,10.25) 163(-15.25,9.75) 164(-15.25,9.25) 165(-15.25,8.75) 166(-15.25,8.25) 167(-15.25,7.75) 168(-15.25,7.25) 169(-15.25,6.75) 170(-15.25,6.25) 171(-15.25,5.75) 172(-15.25,5.25) 173(-15.25,4.75) 174(-15.25,4.25) 175(-15.25,3.75) 176(-15.25,3.25) 177(-15.25,2.75) 178(-15.25,2.25) 179(-15.25,1.75) 180(-15.25,1.25) 181(-15.25,0.75) 182(-15.25,0.25) 183(-15.25,-0.25) 184(-15.25,-0.75) 185(-15.25,-1.25) 186(-15.25,-1.75) 187(-15.25,-2.25) 188(-15.25,-2.75) 189(-15.25,-3.25) 190(-15.25,-3.75) 191(-15.25,-4.25) 192(-15.25,-4.75) 193(-15.25,-5.25) 194(-15.25,-5.75) 195(-15.25,-6.25) 196(-15.25,-6.75) 197(-15.25,-7.25) 198(-15.25,-7.75) 199(-15.25,-8.25) 200(-15.25,-8.75) 201(-15.25,-9.25) 202(-15.25,-9.75) 203(-15.25,-10.25) 204(-15.25,-10.75) 205(-15.25,-11.25) 206(-15.25,-11.75) 207(-15.25,-12.25) 208(-15.25,-12.75)
Top Overlay:
  circle w0.6: c-14.7,-14.8 r0.5
  circle w0.3: c-10.845,-10.805 r0.925
  lines w0.25: -16.1,-13.225 -16.1,-16.1 -13.225,-16.1 ; -16.1,13.225 -16.1,16.1 -13.225,16.1 ; 13.225,-16.1 16.1,-16.1 16.1,-13.225 ; 13.225,16.1 16.1,16.1 16.1,13.225 ; -13.465,-11.68 -13.465,13.465 13.465,13.465 13.465,-13.465 -11.68,-13.465 -13.465,-11.68
Mechanical 15:
  lines w0.1: -0.5,0.002 0.5,0.002 ; 0,-0.498 0,0.502
3D body "User Library-LQFP-208.STEP": height 1.4, standoff 0, extent -14.75,-14.775 14.75,14.725

## LQFP_208 [mm] "SQFP, 208-Leads, Body 30.4x30.4mm (max), Pitch 0.50mm, IPC Medium Density"
height 1.7
pads (208):
  rect 1.95x0.3 smd: 1(-14.575,12.75) 2(-14.575,12.25) 3(-14.575,11.75) 4(-14.575,11.25) 5(-14.575,10.75) 6(-14.575,10.25) 7(-14.575,9.75) 8(-14.575,9.25) 9(-14.575,8.75) 10(-14.575,8.25) 11(-14.575,7.75) 12(-14.575,7.25) 13(-14.575,6.75) 14(-14.575,6.25) 15(-14.575,5.75) 16(-14.575,5.25) 17(-14.575,4.75) 18(-14.575,4.25) 19(-14.575,3.75) 20(-14.575,3.25) 21(-14.575,2.75) 22(-14.575,2.25) 23(-14.575,1.75) 24(-14.575,1.25) 25(-14.575,0.75) 26(-14.575,0.25) 27(-14.575,-0.25) 28(-14.575,-0.75) 29(-14.575,-1.25) 30(-14.575,-1.75) 31(-14.575,-2.25) 32(-14.575,-2.75) 33(-14.575,-3.25) 34(-14.575,-3.75) 35(-14.575,-4.25) 36(-14.575,-4.75) 37(-14.575,-5.25) 38(-14.575,-5.75) 39(-14.575,-6.25) 40(-14.575,-6.75) 41(-14.575,-7.25) 42(-14.575,-7.75) 43(-14.575,-8.25) 44(-14.575,-8.75) 45(-14.575,-9.25) 46(-14.575,-9.75) 47(-14.575,-10.25) 48(-14.575,-10.75) 49(-14.575,-11.25) 50(-14.575,-11.75) 51(-14.575,-12.25) 52(-14.575,-12.75) 105(14.575,-12.75) 106(14.575,-12.25) 107(14.575,-11.75) 108(14.575,-11.25) 109(14.575,-10.75) 110(14.575,-10.25) 111(14.575,-9.75) 112(14.575,-9.25) 113(14.575,-8.75) 114(14.575,-8.25) 115(14.575,-7.75) 116(14.575,-7.25) 117(14.575,-6.75) 118(14.575,-6.25) 119(14.575,-5.75) 120(14.575,-5.25) 121(14.575,-4.75) 122(14.575,-4.25) 123(14.575,-3.75) 124(14.575,-3.25) 125(14.575,-2.75) 126(14.575,-2.25) 127(14.575,-1.75) 128(14.575,-1.25) 129(14.575,-0.75) 130(14.575,-0.25) 131(14.575,0.25) 132(14.575,0.75) 133(14.575,1.25) 134(14.575,1.75) 135(14.575,2.25) 136(14.575,2.75) 137(14.575,3.25) 138(14.575,3.75) 139(14.575,4.25) 140(14.575,4.75) 141(14.575,5.25) 142(14.575,5.75) 143(14.575,6.25) 144(14.575,6.75) 145(14.575,7.25) 146(14.575,7.75) 147(14.575,8.25) 148(14.575,8.75) 149(14.575,9.25) 150(14.575,9.75) 151(14.575,10.25) 152(14.575,10.75) 153(14.575,11.25) 154(14.575,11.75) 155(14.575,12.25) 156(14.575,12.75)
  rect 0.3x1.95 smd: 53(-12.75,-14.575) 54(-12.25,-14.575) 55(-11.75,-14.575) 56(-11.25,-14.575) 57(-10.75,-14.575) 58(-10.25,-14.575) 59(-9.75,-14.575) 60(-9.25,-14.575) 61(-8.75,-14.575) 62(-8.25,-14.575) 63(-7.75,-14.575) 64(-7.25,-14.575) 65(-6.75,-14.575) 66(-6.25,-14.575) 67(-5.75,-14.575) 68(-5.25,-14.575) 69(-4.75,-14.575) 70(-4.25,-14.575) 71(-3.75,-14.575) 72(-3.25,-14.575) 73(-2.75,-14.575) 74(-2.25,-14.575) 75(-1.75,-14.575) 76(-1.25,-14.575) 77(-0.75,-14.575) 78(-0.25,-14.575) 79(0.25,-14.575) 80(0.75,-14.575) 81(1.25,-14.575) 82(1.75,-14.575) 83(2.25,-14.575) 84(2.75,-14.575) 85(3.25,-14.575) 86(3.75,-14.575) 87(4.25,-14.575) 88(4.75,-14.575) 89(5.25,-14.575) 90(5.75,-14.575) 91(6.25,-14.575) 92(6.75,-14.575) 93(7.25,-14.575) 94(7.75,-14.575) 95(8.25,-14.575) 96(8.75,-14.575) 97(9.25,-14.575) 98(9.75,-14.575) 99(10.25,-14.575) 100(10.75,-14.575) 101(11.25,-14.575) 102(11.75,-14.575) 103(12.25,-14.575) 104(12.75,-14.575) 157(12.75,14.575) 158(12.25,14.575) 159(11.75,14.575) 160(11.25,14.575) 161(10.75,14.575) 162(10.25,14.575) 163(9.75,14.575) 164(9.25,14.575) 165(8.75,14.575) 166(8.25,14.575) 167(7.75,14.575) 168(7.25,14.575) 169(6.75,14.575) 170(6.25,14.575) 171(5.75,14.575) 172(5.25,14.575) 173(4.75,14.575) 174(4.25,14.575) 175(3.75,14.575) 176(3.25,14.575) 177(2.75,14.575) 178(2.25,14.575) 179(1.75,14.575) 180(1.25,14.575) 181(0.75,14.575) 182(0.25,14.575) 183(-0.25,14.575) 184(-0.75,14.575) 185(-1.25,14.575) 186(-1.75,14.575) 187(-2.25,14.575) 188(-2.75,14.575) 189(-3.25,14.575) 190(-3.75,14.575) 191(-4.25,14.575) 192(-4.75,14.575) 193(-5.25,14.575) 194(-5.75,14.575) 195(-6.25,14.575) 196(-6.75,14.575) 197(-7.25,14.575) 198(-7.75,14.575) 199(-8.25,14.575) 200(-8.75,14.575) 201(-9.25,14.575) 202(-9.75,14.575) 203(-10.25,14.575) 204(-10.75,14.575) 205(-11.25,14.575) 206(-11.75,14.575) 207(-12.25,14.575) 208(-12.75,14.575)
Top Overlay:
  circle w0.25: c-14.575,13.45 r0.125
  circle w0.6: c-12.2,12.2 r0.3
  lines w0.2: -13.2,-13.2 -13.2,13.2 13.2,13.2 13.2,-13.2 -13.2,-13.2
Mechanical 13:
  circle w0.1: c-13.05,13.05 r0.5
  lines w0.1: -14,-14 -14,14 14,14 14,-14 -14,-14
Mechanical 15:
  lines w0.1: -0.5,0 0.5,0 ; 0,-0.5 0,0.5 ; -15.775,-15.775 -15.775,15.775 15.775,15.775 15.775,-15.775 -15.775,-15.775
3D body: height 1.7, standoff 0.1, extent -14,-14 14,14

## LTV-81X-SMD [mm]
height 1.2
pads (4):
  rect 1.5x1.8 smd: 1(0,0) 2(2.54,0) 3(2.54,8.89) 4(0,8.89)
Top Overlay:
  lines w0.254: -1.016,1.27 -1.016,3.937 ccw(c-1.016,4.572) -1.016,5.207 -1.016,7.62 3.556,7.62 3.556,1.27 -1.016,1.27

## M95 [mm] "GSM/GPRS Module Series"
height 2.85
pads (42):
  rrect50% 2.4x0.75 smd: 1(-9.8,7.5) 2(-9.8,6.4) 3(-9.8,5.3) 4(-9.8,4.2) 5(-9.8,3.1) 6(-9.8,-1.9) 7(-9.8,-3) 8(-9.8,-4.1) 9(-9.8,-5.2) 10(-9.8,-6.3) 11(-9.8,-7.4) 21(9.8,-7.4) 22(9.8,-6.3) 23(9.8,-5.2) 24(9.8,-4.1) 25(9.8,-3) 26(9.8,-1.9) 27(9.8,3.1) 28(9.8,4.2) 29(9.8,5.3) 30(9.8,6.4) 31(9.8,7.5)
  rrect50% 0.75x2.4 smd: 12(-6.35,-11.65) 13(-5.25,-11.65) 14(-4.15,-11.65) 15(-3.05,-11.65) 16(1.65,-11.65) 17(2.75,-11.65) 18(3.85,-11.65) 19(4.95,-11.65) 20(6.05,-11.65) 32(6.05,11.65) 33(4.95,11.65) 34(3.85,11.65) 35(2.75,11.65) 36(1.65,11.65) 37(-3.05,11.65) 38(-4.15,11.65) 39(-5.25,11.65) 40(-6.35,11.65) 41(-0.05,-11.65) 42(-1.35,-11.65)
Top Overlay:
  lines w0.254: -10.025,-8.4 -10.025,-11.875 -7.35,-11.875 ; -10.025,-0.9 -10.025,2.1 ; -10.025,8.5 -10.025,10.375 -8.525,11.875 -7.35,11.875 ; -2.05,11.875 0.65,11.875 ; 7.05,-11.875 10.025,-11.875 10.025,-8.4 ; 7.05,11.875 10.025,11.875 10.025,8.5 ; 10.025,-0.9 10.025,2.1
3D body "User Library-M95_3d_150727_asm.STEP": height 2.65, standoff 0, extent -9.95,-11.8 9.95,11.8

## MC-306 [mm]
height 1.6
pads (4):
  rect 1.3x1.9 smd: 1(-2.75,-1.6) 2(2.75,-1.6) 3(2.75,1.6) 4(-2.75,1.6)
Top Overlay:
  lines w0.152: -3.556,-1.9 -4,-1.9 -4,1.9 -3.531,1.9 ; -2,-1.9 2,-1.9 ; -2,1.9 2,1.9 ; 3.48,-1.9 4,-1.9 4,1.9 3.48,1.9
  lines w0.2: -3.937,-0.394 ccw(c-3.937,0.006) -3.937,0.406